# Altium footprint library chipfc_libs.PCBLIB: 315 footprints (part 9 of 20)
Each footprint in its own frame and in the unit in brackets; x right, y up, seen from the top. Pads: shape width x height; smd on the part's side, far side on the other; paste and mask are expansions set on the pad; w line width, h text height; cw(c..) or ccw(c..) is an arc to the next point about the centre after c.
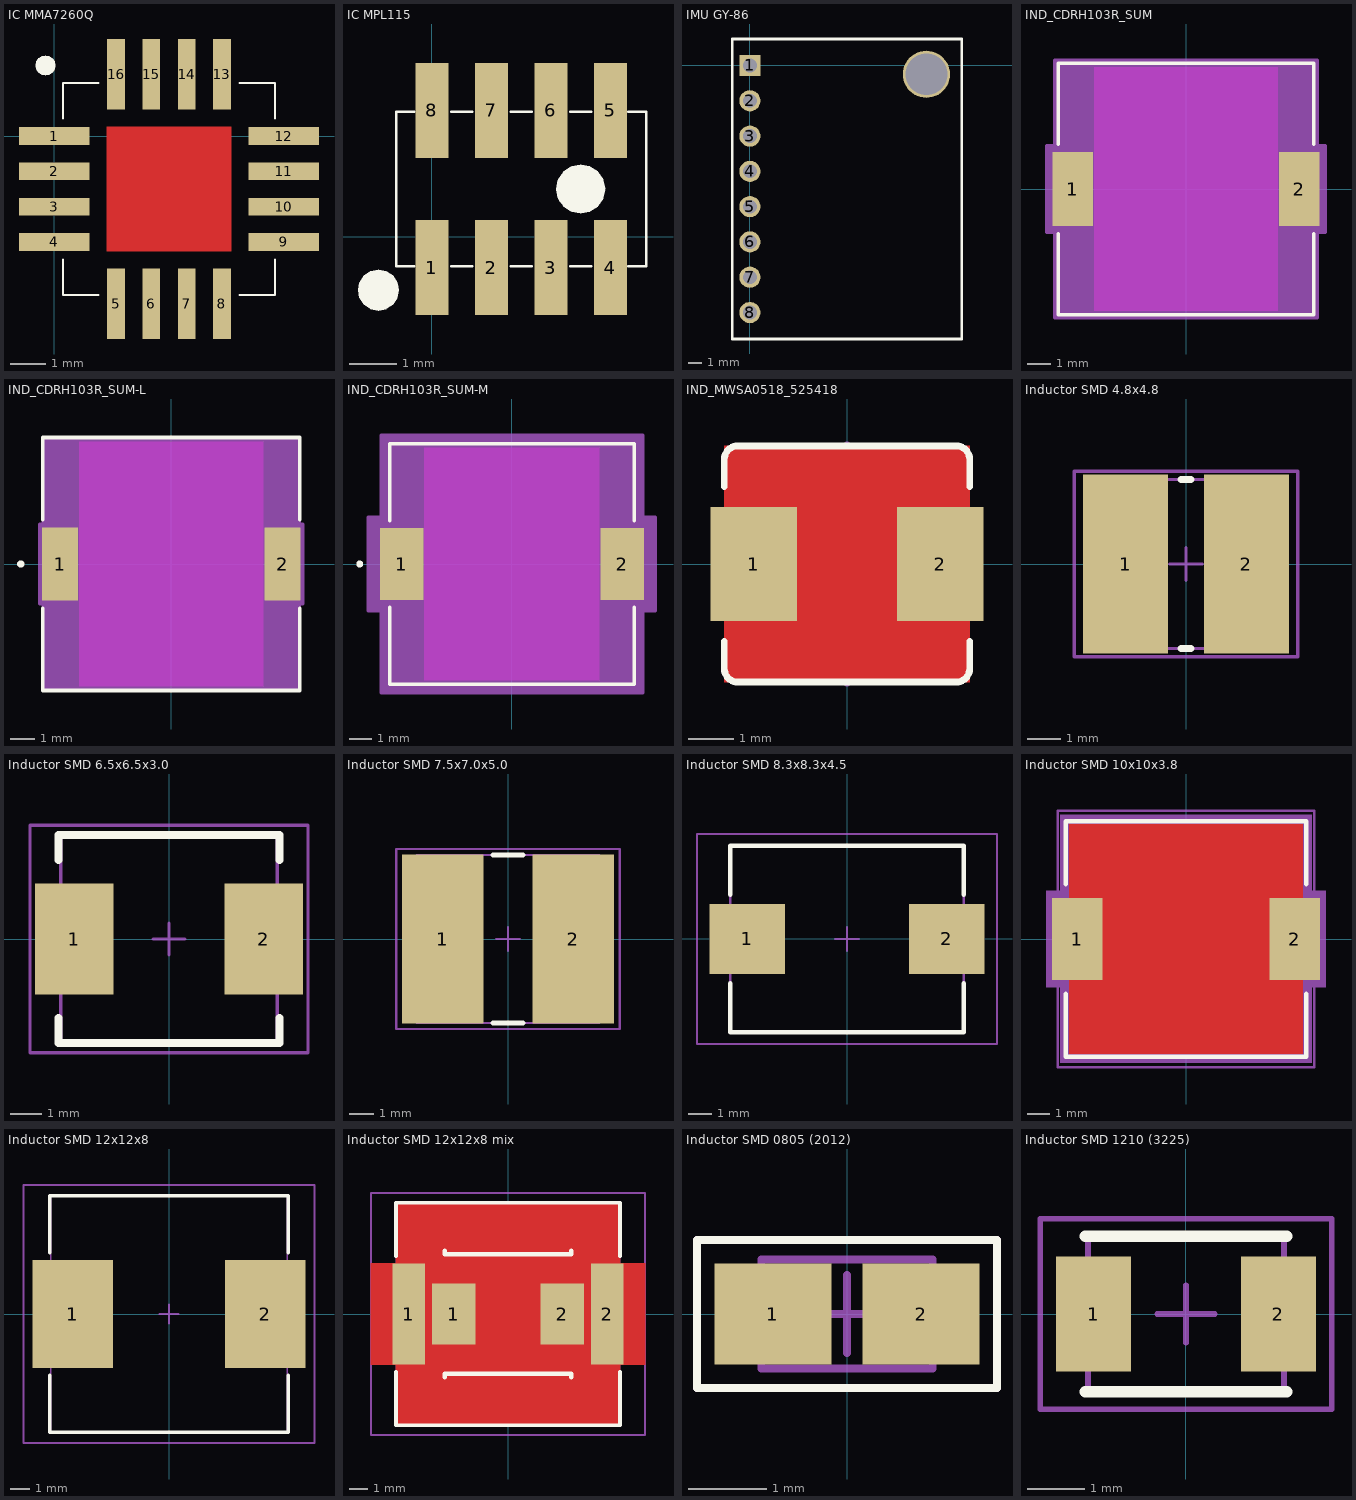
[diagram p8: the footprints below, top view; thin cyan lines are the x and y axes]

## IC MMA7260Q [mil]
pads (16):
  rect 78.73x19.67 smd: 1(0,0) 2(0,-39.37) 3(0,-78.73) 4(0,-118.1) 9(255.88,-118.1) 10(255.88,-78.73) 11(255.88,-39.37) 12(255.88,0)
  rect 19.67x78.73 smd: 5(68.88,-186.98) 6(108.25,-186.98) 7(147.62,-186.98) 8(187,-186.98) 13(187,68.88) 14(147.62,68.88) 15(108.25,68.88) 16(68.88,68.88)
Top Layer:
  region: 197.22,10.22 197.37,9.83 197.37,-127.93 197.22,-128.32 196.83,-128.47 59.05,-128.47 58.67,-128.32 58.51,-127.93 58.51,9.83 58.67,10.22 59.05,10.37 196.83,10.37
Top Overlay:
  region: -5.78,89.06 -5.61,88.94 -5.4,88.9 -2.14,86.72 -2.02,86.54 -1.85,86.43 0.33,83.17 0.37,82.96 0.49,82.78 1.25,78.94 1.21,78.73 1.25,78.53 0.49,74.68 0.37,74.51 0.33,74.3 -1.85,71.04 -2.02,70.92 -2.14,70.75 -5.4,68.57 -5.61,68.53 -5.78,68.41 -9.63,67.65 -9.73,67.67 -9.83,67.63 -9.97,67.68 -10.03,67.66 -10.12,67.7 -10.22,67.68 -13.88,68.41 -14.06,68.53 -14.27,68.57 -17.53,70.75 -17.64,70.92 -17.82,71.04 -20,74.3 -20.04,74.51 -20.16,74.68 -20.92,78.53 -20.88,78.73 -20.92,78.94 -20.16,82.78 -20.04,82.96 -20,83.17 -17.82,86.43 -17.64,86.54 -17.53,86.72 -14.27,88.9 -14.06,88.94 -13.88,89.06 -10.04,89.82 -9.83,89.78 -9.63,89.82
  lines w1.97: 9.83,-137.78 9.83,-177.15 49.2,-177.15 ; 9.83,19.68 9.83,59.05 49.2,59.05 ; 206.67,-177.15 246.03,-177.15 246.03,-137.78 ; 206.67,59.05 246.03,59.05 246.03,19.68
Top Solder:
  region: 197.22,10.22 197.37,9.83 197.37,-127.93 197.22,-128.32 196.83,-128.47 59.05,-128.47 58.67,-128.32 58.51,-127.93 58.51,9.83 58.67,10.22 59.05,10.37 196.83,10.37

## IC MPL115 [mm]
pads (8):
  rect 0.699x2 smd: 1(0,-0.65) 2(1.25,-0.65) 3(2.5,-0.65) 4(3.75,-0.65) 5(3.75,2.65) 6(2.5,2.65) 7(1.25,2.65) 8(0,2.65)
Top Overlay:
  region: -0.965,-0.726 -0.961,-0.729 -0.956,-0.73 -0.825,-0.817 -0.822,-0.822 -0.817,-0.825 -0.73,-0.956 -0.729,-0.961 -0.726,-0.965 -0.72,-0.994 -0.721,-0.996 -0.72,-0.998 -0.72,-0.999 -0.719,-1.001 -0.695,-1.12 -0.696,-1.125 -0.695,-1.13 -0.726,-1.284 -0.729,-1.289 -0.73,-1.294 -0.817,-1.425 -0.822,-1.428 -0.825,-1.432 -0.956,-1.52 -0.961,-1.521 -0.965,-1.524 -1.12,-1.554 -1.125,-1.553 -1.13,-1.554 -1.284,-1.524 -1.289,-1.521 -1.294,-1.52 -1.425,-1.432 -1.428,-1.428 -1.432,-1.425 -1.52,-1.294 -1.521,-1.289 -1.524,-1.284 -1.554,-1.13 -1.553,-1.125 -1.554,-1.12 -1.524,-0.965 -1.521,-0.961 -1.52,-0.956 -1.432,-0.825 -1.428,-0.822 -1.425,-0.817 -1.294,-0.73 -1.289,-0.729 -1.284,-0.726 -1.13,-0.695 -1.125,-0.696 -1.12,-0.695
  region: 3.312,1.478 3.32,1.472 3.331,1.47 3.48,1.37 3.486,1.361 3.495,1.355 3.595,1.206 3.597,1.195 3.603,1.186 3.638,1.01 3.636,1 3.638,0.989 3.603,0.813 3.597,0.805 3.595,0.794 3.495,0.645 3.486,0.639 3.48,0.63 3.331,0.53 3.32,0.528 3.312,0.522 3.136,0.487 3.125,0.489 3.114,0.487 2.939,0.522 2.93,0.528 2.919,0.53 2.77,0.63 2.764,0.639 2.755,0.645 2.705,0.72 2.701,0.726 2.655,0.794 2.653,0.805 2.647,0.813 2.612,0.989 2.614,1 2.612,1.01 2.647,1.186 2.653,1.195 2.655,1.206 2.755,1.355 2.764,1.361 2.77,1.37 2.919,1.47 2.93,1.472 2.939,1.478 3.114,1.513 3.125,1.511 3.136,1.513
  lines w0.05: -0.375,-0.625 -0.75,-0.625 -0.75,2.625 -0.375,2.625 ; 0.4,-0.625 0.85,-0.625 ; 0.4,2.625 0.85,2.625 ; 1.65,-0.625 2.1,-0.625 ; 1.65,2.625 2.1,2.625 ; 2.9,-0.625 3.35,-0.625 ; 2.9,2.625 3.35,2.625 ; 4.125,-0.625 4.5,-0.625 4.5,2.625 4.125,2.625

## IMU GY-86 [mil] "IMU GY-86, includes MPU6050, HMC5883L, MS5611"
pads (9):
  rect 60x60 / inner round 60 / far side rect 80x60 hole 39: 1(0,0)
  round 60 / inner round 60 / far side oval 80x60 hole 39: 2(0,-100) 3(0,-200) 4(0,-300) 5(0,-400) 6(0,-500) 7(0,-600) 8(0,-700)
  round 133.86 hole 118.11: ""(500,-25)
Top Overlay:
  lines w8: -50,-775 600,-775 600,75 -50,75 -50,-775

## IND_CDRH103R_SUM [mil]
pads (2):
  rect 67x122 smd paste+0 mask+0: 1(-187,0) 2(187,0)
Top Layer keep-out:
  region: -151.5,-201 -151.5,201 151.5,201 151.5,-201
Top Overlay:
  lines w6: -211.5,-74.1 -211.5,-208 211.5,-208 211.5,-74.1 ; -211.5,74.1 -211.5,208 211.5,208 211.5,74.1
Keep-Out Layer:
  region: -151.5,-201 -151.5,201 151.5,201 151.5,-201
Mechanical 13:
  lines w1: -206.5,-203 -206.5,203 206.5,203 206.5,-203 -206.5,-203 ; -206.5,-61 -206.5,61 -206.5,-61 ; 206.5,-61 206.5,61 206.5,-61
Mechanical 15:
  region: -216.5,-71 -230.5,-71 -230.5,71 -216.5,71 -216.5,213 216.5,213 216.5,71 230.5,71 230.5,-71 216.5,-71 216.5,-213 -216.5,-213
  lines w6: -230.5,-71 -216.5,-71 -216.5,-213 216.5,-213 216.5,-71 230.5,-71 230.5,71 216.5,71 216.5,213 -216.5,213 -216.5,71 -230.5,71 -230.5,-71
3D body "IND_CDRH103R_SUM.step": height 122.09, standoff 0, extent -206.5,-202.99 206.5,202.99

## IND_CDRH103R_SUM-L [mil]
pads (2):
  rect 59x120 smd paste+0 mask+0: 1(-183,0) 2(183,0)
Top Layer keep-out:
  region: -151.5,-201 -151.5,201 151.5,201 151.5,-201
Top Overlay:
  circle w6: c-247.5,0 r3
  lines w6: -211.5,-73.1 -211.5,-208 211.5,-208 211.5,-73.1 ; -211.5,73.1 -211.5,208 211.5,208 211.5,73.1
Keep-Out Layer:
  region: -151.5,-201 -151.5,201 151.5,201 151.5,-201
Mechanical 13:
  circle w0: c-183,0 r3
  lines w1: -206.5,-203 -206.5,203 206.5,203 206.5,-203 -206.5,-203 ; -206.5,-61 -206.5,61 -206.5,-61 ; 206.5,-61 206.5,61 206.5,-61
Mechanical 15:
  region: -210.5,-65 -216.5,-65 -216.5,65 -210.5,65 -210.5,207 210.5,207 210.5,65 216.5,65 216.5,-65 210.5,-65 210.5,-207 -210.5,-207
  lines w6: -216.5,-65 -210.5,-65 -210.5,-207 210.5,-207 210.5,-65 216.5,-65 216.5,65 210.5,65 210.5,207 -210.5,207 -210.5,65 -216.5,65 -216.5,-65
3D body "IND_CDRH103R_SUM.step": height 122.09, standoff 0, extent -206.5,-202.99 206.5,202.99

## IND_CDRH103R_SUM-M [mil]
pads (2):
  rect 75x124 smd paste+0 mask+0: 1(-191,0) 2(191,0)
Top Layer keep-out:
  region: -151.5,-201 -151.5,201 151.5,201 151.5,-201
Top Overlay:
  circle w6: c-263.5,0 r3
  lines w6: -211.5,-75.1 -211.5,-208 211.5,-208 211.5,-75.1 ; -211.5,75.1 -211.5,208 211.5,208 211.5,75.1
Keep-Out Layer:
  region: -151.5,-201 -151.5,201 151.5,201 151.5,-201
Mechanical 13:
  circle w0: c-191,0 r3
  lines w1: -206.5,-203 206.5,-203 206.5,203 -206.5,203 -206.5,-203 ; -206.5,-61 -206.5,61 -206.5,-61 ; 206.5,-61 206.5,61 206.5,-61
Mechanical 15:
  region: -226.5,-81 -248.5,-81 -248.5,81 -226.5,81 -226.5,223 226.5,223 226.5,81 248.5,81 248.5,-81 226.5,-81 226.5,-223 -226.5,-223
  lines w6: -248.5,-81 -248.5,81 -226.5,81 -226.5,223 226.5,223 226.5,81 248.5,81 248.5,-81 226.5,-81 226.5,-223 -226.5,-223 -226.5,-81 -248.5,-81
3D body "IND_CDRH103R_SUM.step": height 122.09, standoff 0, extent -206.5,-202.99 206.5,202.99

## IND_MWSA0518_525418 [mm]
pads (2):
  rect 1.9x2.5 smd paste+0 mask+0: 1(-2.05,0) 2(2.05,0)
Top Layer:
  pour cut-out: -2.7,2.6 2.7,2.6 2.7,-2.6 -2.7,-2.6
Top Overlay:
  lines w0.152: -2.7,-1.7 -2.7,-2.3 ccw(c-2.4,-2.3) -2.4,-2.6 2.4,-2.6 ccw(c2.4,-2.3) 2.7,-2.3 2.7,-1.7 ; -2.7,1.7 -2.7,2.3 cw(c-2.4,2.3) -2.4,2.6 2.4,2.6 cw(c2.4,2.3) 2.7,2.3 2.7,1.7
Mechanical 1:
  lines w0.2: -2.7,0 0,0 ; 0,-2.6 0,0 ; 0,2.6 0,0 ; 2.7,0 0,0
3D body: height 1.8, standoff 0, extent -2.7,-2.6 2.7,2.6

## Inductor SMD 4.8x4.8 [mm] "Precision Wire Wound Inductor, 2-Leads, Body 4.8x4.8mm, IPC Medium Density"
height 2.8
pads (2):
  rect 2.55x5.4 smd: 1(-1.825,0) 2(1.825,0)
Top Overlay:
  lines w0.2: -0.15,-2.55 0.15,-2.55 ; -0.15,2.55 0.15,2.55
Mechanical 13:
  lines w0.1: -2.55,-2.55 2.55,-2.55 2.55,2.55 -2.55,2.55 -2.55,-2.55
Mechanical 15:
  lines w0.1: -0.5,0 0.5,0 ; 0,-0.5 0,0.5 ; -3.375,-2.8 3.375,-2.8 3.375,2.8 -3.375,2.8 -3.375,-2.8
3D body: height 2.8, standoff 0, extent -2.55,-2.55 2.55,2.55

## Inductor SMD 6.5x6.5x3.0 [mm] "Precision Wire Wound Inductor, 2-Leads, Body 10.0x8.0mm, IPC Low Density"
height 4.5
pads (2):
  rect 2.5x3.5 smd: 1(-3,0) 2(3,0)
Top Overlay:
  lines w0.254: -3.5,-2.5 -3.5,-3.3 3.5,-3.3 3.5,-2.5 ; -3.5,2.5 -3.5,3.3 3.5,3.3 3.5,2.5
Mechanical 13:
  lines w0.1: -3.43,-3.235 3.43,-3.235 3.43,3.235 -3.43,3.235 -3.43,-3.235
Mechanical 15:
  lines w0.1: -0.5,0 0.5,0 ; 0,-0.5 0,0.5 ; -4.4,-3.6 4.4,-3.6 4.4,3.6 -4.4,3.6 -4.4,-3.6
3D body "User Library-IHLP-2525CZ.step": height 3, standoff 0, extent -3.43,-3.235 3.43,3.235

## Inductor SMD 7.5x7.0x5.0 [mm] "Precision Wire Wound Inductor, 2-Leads, Body 7.5x7.0mm, IPC Medium Density"
height 5
pads (2):
  rect 3.4x7.05 smd: 1(-2.725,0) 2(2.725,0)
Top Overlay:
  lines w0.2: -0.625,-3.5 0.625,-3.5 ; -0.625,3.5 0.625,3.5
Mechanical 13:
  lines w0.1: -3.8,-3.5 3.8,-3.5 3.8,3.5 -3.8,3.5 -3.8,-3.5
Mechanical 15:
  lines w0.1: -0.5,0 0.5,0 ; 0,-0.5 0,0.5 ; -4.65,-3.75 4.65,-3.75 4.65,3.75 -4.65,3.75 -4.65,-3.75
3D body: height 5, standoff 0, extent -3.77,-3.792 3.8,3.793

## Inductor SMD 8.3x8.3x4.5 [mm] "Precision Wire Wound Inductor, 2-Leads, Body 10.0x8.0mm, IPC Low Density"
height 4.5
pads (2):
  rect 3.25x3 smd: 1(-4.275,0) 2(4.275,0)
Top Overlay:
  lines w0.2: -5,-1.9 -5,-4 5,-4 5,-1.9 ; -5,1.9 -5,4 5,4 5,1.9
Mechanical 13:
  lines w0.1: -5,-4 5,-4 5,4 -5,4 -5,-4
Mechanical 15:
  lines w0.1: -0.5,0 0.5,0 ; 0,-0.5 0,0.5 ; -6.425,-4.5 6.425,-4.5 6.425,4.5 -6.425,4.5 -6.425,-4.5
3D body "User Library-inductor SDR0805.step": height 5.3, standoff 0, extent -3.9,-3.9 3.9,3.9

## Inductor SMD 10x10x3.8 [mm] "Precision Wire Wound Inductor, 2-Leads, Body 12.3x12.3mm, IPC Low Density"
height 8
pads (2):
  rect 2.2x3.6 smd: 1(-4.75,0) 2(4.75,0)
Top Layer:
  pour cut-out: -5.1,5 5.1,5 5.1,-5 -5.1,-5
Bottom Layer:
  pour cut-out: -5.1,5 5.1,5 5.1,-5 -5.1,-5
Top Overlay:
  lines w0.2: -5.25,-2.4 -5.25,-5.15 5.25,-5.15 5.25,-2.4 ; -5.25,2.4 -5.25,5.15 5.25,5.15 5.25,2.4
Mechanical 13:
  lines w0.1: -5.25,-2.75 -2.85,-5.15 5.25,-5.15 5.25,5.15 -5.25,5.15 -5.25,-2.75
Mechanical 15:
  region: 5.499,2.1 6.1,2.1 6.1,-2.1 5.499,-2.1 5.499,-5.4 -5.499,-5.4 -5.499,-2.1 -6.1,-2.1 -6.1,2.1 -5.499,2.1 -5.499,5.42 5.499,5.42
  lines w0.1: -0.5,0 0.5,0 ; 0,-0.5 0,0.5 ; -5.6,-5.6 5.6,-5.6 5.6,5.6 -5.6,5.6 -5.6,-5.6
3D body "User Library-cdrh104r.STEP": height 4, standoff 0, extent -5.25,-5.15 5.25,5.15

## Inductor SMD 12x12x8 [mm] "Precision Wire Wound Inductor, 2-Leads, Body 12.3x12.3mm, IPC Low Density"
height 8
pads (2):
  rect 4.2x5.6 smd: 1(-5,0) 2(5,0)
Top Overlay:
  lines w0.2: -6.2,-3.2 -6.2,-6.15 6.2,-6.15 6.2,-3.2 ; -6.2,3.2 -6.2,6.15 6.2,6.15 6.2,3.2
Mechanical 13:
  lines w0.1: -6.15,-6.15 -6.15,6.15 6.15,6.15 6.15,-6.15 -6.15,-6.15
Mechanical 15:
  lines w0.1: -0.5,0 0.5,0 ; 0,-0.5 0,0.5 ; -7.575,-6.7 -7.575,6.7 7.575,6.7 7.575,-6.7 -7.575,-6.7
3D body "User Library-DRQ127_12_5x12_5.step": height 8.01, standoff 0.01, extent -6.25,-6.25 6.25,6.25

## Inductor SMD 12x12x8 mix [mm] "Precision Wire Wound Inductor, 2-Leads, Body 12.3x12.3mm, IPC Low Density"
height 8
pads (4):
  rect 1.8x5.6 smd: 1(-5.5,0) 2(5.5,0)
  rect 2.4x3.4 smd: 1(-3,0) 2(3,0)
Top Layer:
  region: 3.4,2.8 3.4,2.1 4.6,2.1 4.6,-2.1 3.4,-2.1 3.4,-2.8 7.6,-2.8 7.6,2.8
  region: -3.4,2.8 -3.4,2.1 -4.6,2.1 -4.6,-2.1 -3.4,-2.1 -3.4,-2.8 -7.6,-2.8 -7.6,2.8
  pour cut-out: 6.2,6.2 6.2,-6.2 -6.2,-6.2 -6.2,6.2
Bottom Layer:
  pour cut-out: 6.2,6.2 6.2,-6.2 -6.2,-6.2 -6.2,6.2
Top Overlay:
  lines w0.2: -6.2,-3.2 -6.2,-6.15 6.2,-6.15 6.2,-3.2 ; -6.2,3.2 -6.2,6.15 6.2,6.15 6.2,3.2
  lines w0.254: -3.5,-3.5 -3.5,-3.3 3.5,-3.3 3.5,-3.5 ; -3.5,3.5 -3.5,3.3 3.5,3.3 3.5,3.5
Top Solder:
  region: 3.3,2.9 3.3,2 4.5,2 4.5,-2 3.3,-2 3.3,-2.9 7.7,-2.9 7.7,2.9
  region: -3.3,2.9 -3.3,2 -4.5,2 -4.5,-2 -3.3,-2 -3.3,-2.9 -7.7,-2.9 -7.7,2.9
Mechanical 13:
  lines w0.1: -6.15,-6.15 6.15,-6.15 6.15,6.15 -6.15,6.15 -6.15,-6.15 ; -3.43,-3.235 -3.43,3.235 3.43,3.235 3.43,-3.235 -3.43,-3.235
Mechanical 15:
  lines w0.1: -0.5,0 0.5,0 ; 0,-0.5 0,0.5 ; -7.575,-6.7 7.575,-6.7 7.575,6.7 -7.575,6.7 -7.575,-6.7 ; -4.4,-3.6 -4.4,3.6 4.4,3.6 4.4,-3.6 -4.4,-3.6
3D body "User Library-IHLP-2525CZ.step": height 3, standoff 0, extent -3.43,-3.235 3.43,3.235
3D body "User Library-DRQ127_12_5x12_5.step": height 8.01, standoff 0.01, extent -6.25,-6.25 6.25,6.25

## Inductor SMD 0805 (2012) [mm] "Precision Wire Wound Inductor, 2-Leads, Body 2.0x1.2mm, IPC Medium Density"
height 1
pads (2):
  rect 1.5x1.3 smd: 1(-0.95,0) 2(0.95,0)
Top Overlay:
  lines w0.1: -1.925,-0.95 1.925,-0.95 1.925,0.95 -1.925,0.95 -1.925,-0.95
Mechanical 13:
  lines w0.1: -1.1,-0.7 1.1,-0.7 1.1,0.7 -1.1,0.7 -1.1,-0.7
Mechanical 15:
  lines w0.1: -0.5,0 0.5,0 ; 0,-0.5 0,0.5 ; -1.925,-0.95 1.925,-0.95 1.925,0.95 -1.925,0.95 -1.925,-0.95
3D body "User Library-Chip Inductor (2).step": height 0.95, standoff 0, extent -1,-0.6 1,0.6

## Inductor SMD 1210 (3225) [mm] "Precision Wire Wound Inductor, 2-Leads, Body 3.2x2.5mm, IPC Medium Density"
height 2.4
pads (2):
  rect 1.3x2 smd: 1(-1.6,0) 2(1.6,0)
Top Overlay:
  lines w0.2: -1.75,-1.35 1.75,-1.35 ; -1.75,1.35 1.75,1.35
Mechanical 13:
  lines w0.1: -1.7,-1.35 -1.7,1.35 1.7,1.35 1.7,-1.35 -1.7,-1.35
Mechanical 15:
  lines w0.1: -0.5,0 0.5,0 ; 0,-0.5 0,0.5 ; -2.525,-1.65 -2.525,1.65 2.525,1.65 2.525,-1.65 -2.525,-1.65
3D body "User Library-Chip Inductor.step": height 1.35, standoff 0, extent -1.6,-1.25 1.6,1.25